# Altium schematic symbol library Transistors.SchLib: 24 symbols
Pins are listed as number, name and electrical type; pins without a type are passive.

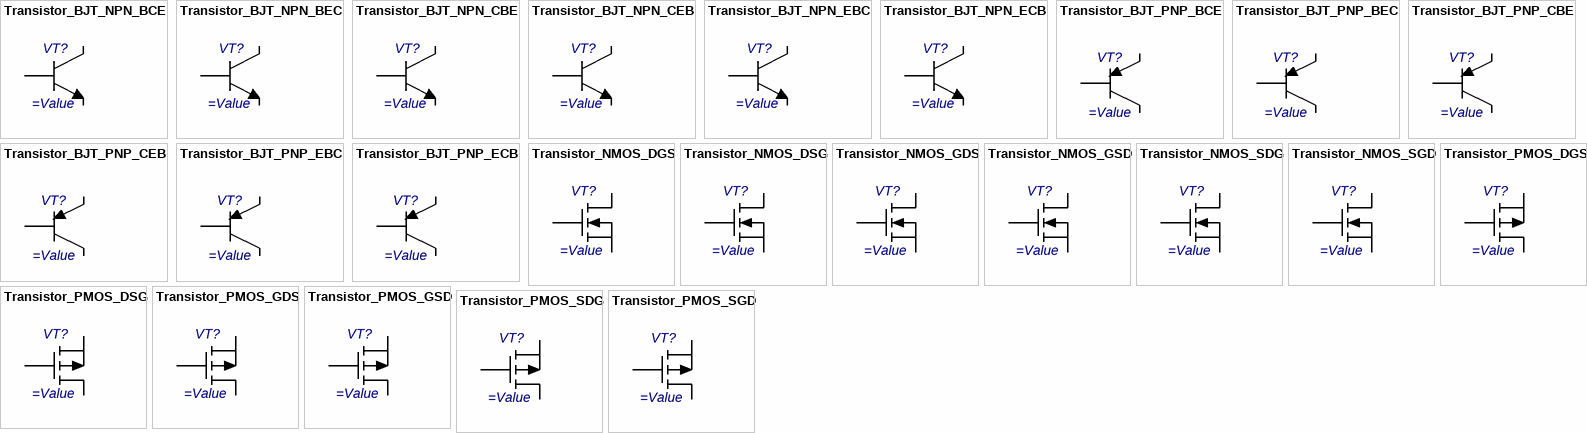
[diagram p0: symbols Transistor_BJT_NPN_BCE to Transistor_PMOS_SGD]

## Transistor_BJT_NPN_BCE
designator VT?
pins: 1 B, 2 C, 3 E

## Transistor_BJT_NPN_BEC
designator VT?
pins: 1 B, 2 E, 3 C

## Transistor_BJT_NPN_CBE
designator VT?
pins: 1 C, 2 B, 3 E

## Transistor_BJT_NPN_CEB
designator VT?
pins: 1 C, 2 E, 3 B

## Transistor_BJT_NPN_EBC
designator VT?
pins: 1 E, 2 B, 3 C

## Transistor_BJT_NPN_ECB
designator VT?
pins: 1 E, 2 C, 3 B

## Transistor_BJT_PNP_BCE
designator VT?
pins: 1 B, 2 C, 3 E

## Transistor_BJT_PNP_BEC
designator VT?
pins: 1 B, 2 E, 3 C

## Transistor_BJT_PNP_CBE
designator VT?
pins: 1 C, 2 B, 3 E

## Transistor_BJT_PNP_CEB
designator VT?
pins: 1 C, 2 E, 3 B

## Transistor_BJT_PNP_EBC
designator VT?
pins: 1 E, 2 B, 3 C

## Transistor_BJT_PNP_ECB
designator VT?
pins: 1 E, 2 C, 3 B

## Transistor_NMOS_DGS
designator VT?
pins: 1 D, 2 G, 3 S

## Transistor_NMOS_DSG
designator VT?
pins: 1 D, 2 S, 3 G

## Transistor_NMOS_GDS
designator VT?
pins: 1 G, 2 D, 3 S

## Transistor_NMOS_GSD
designator VT?
pins: 1 G, 2 S, 3 D

## Transistor_NMOS_SDG
designator VT?
pins: 1 S, 2 D, 3 G

## Transistor_NMOS_SGD
designator VT?
pins: 1 S, 2 G, 3 D

## Transistor_PMOS_DGS
designator VT?
pins: 1 D, 2 G, 3 S

## Transistor_PMOS_DSG
designator VT?
pins: 1 D, 2 S, 3 G

## Transistor_PMOS_GDS
designator VT?
pins: 1 G, 2 D, 3 S

## Transistor_PMOS_GSD
designator VT?
pins: 1 G, 2 S, 3 D

## Transistor_PMOS_SDG
designator VT?
pins: 1 S, 2 D, 3 G

## Transistor_PMOS_SGD
designator VT?
pins: 1 S, 2 G, 3 D